# EAGLE library part TPS61023DRLR (library TPS61023DRLR)
Switching Voltage Regulators 3-A boost converter with 0.5-V ultra-low input voltage 6-SOT-5X3 -40 to 125 Source: Datasheet <http://www.ti.com/lit/ds/symlink/tps61023.pdf>
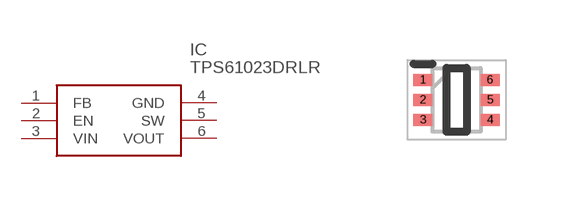
[diagram p0: symbol with the pads of SOTFL50P160X60-6N; footprint SOTFL50P160X60-6N]

Designator prefix IC

## TPS61023DRLR (Description: Switching Voltage Regulators 3-A boost converter with 0.5-V ultra-low input voltage 6-SOT-5X3 -40 to 125; Height: 0.6mm; Manufacturer_Name: Texas Instruments; Manufacturer_Part_Number: TPS61023DRLR; Mouser_Part_Number: 595-TPS61023DRLR; Mouser_Price-Stock: https://www.mouser.co.uk/ProductDetail/Texas-Instruments/TPS61023DRLR?qs=BJlw7L4Cy7%2FfEnwYuWeGOg%3D%3D)  [SOTFL50P160X60-6N]
1  FB
2  EN
3  VIN
4  GND
5  SW
6  VOUT

## Footprint SOTFL50P160X60-6N (pad centres in mm)
SOT563 (6)
smd 0.475 x 0.3: 1 -0.838,0.5; 2 -0.838,0; 3 -0.838,-0.5; 4 0.838,-0.5; 5 0.838,0; 6 0.838,0.5